# Altium footprint library 1.30-二极管-整流桥堆.PcbLib: 59 footprints (part 3 of 4)
Each footprint in its own frame and in the unit in brackets; x right, y up, seen from the top. Pads: shape width x height; smd on the part's side, far side on the other; paste and mask are expansions set on the pad; w line width, h text height; cw(c..) or ccw(c..) is an arc to the next point about the centre after c.
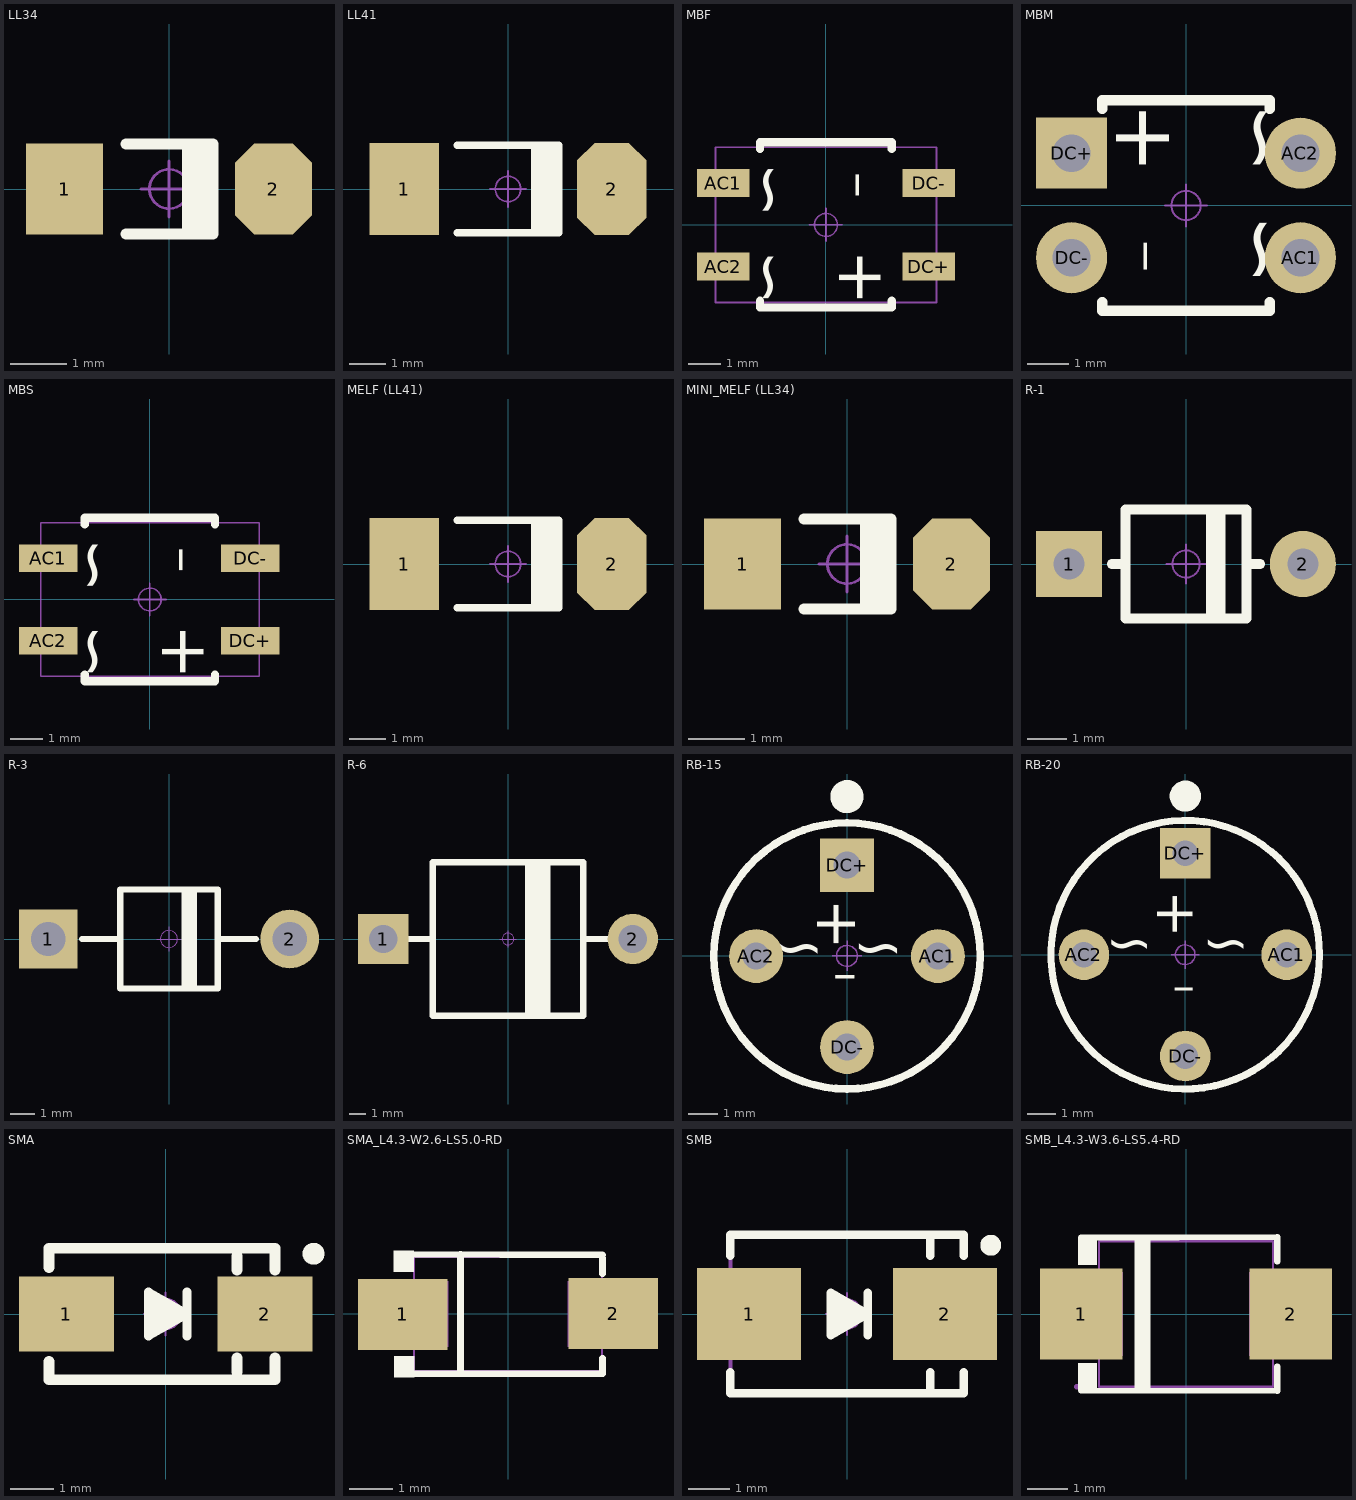
[diagram p2: the footprints below, top view; thin cyan lines are the x and y axes]

## LL34 [mm] "1.5*3.4mm(直径，脚距）"
pads (2):
  rect 1.37x1.62 smd: 1(-1.855,0)
  oct 1.37x1.62 smd: 2(1.855,0)
Top Overlay:
  rectangle: 0.227,-0.8 0.777,0.8
  lines w0.2: -0.762,-0.8 0.777,-0.8 0.777,0.8 -0.762,0.8
Mechanical 15:
  circle w0.05: c0,0 r0.35
  lines w0.05: -0.5,0 0.5,0 ; 0,-0.5 0,0.5
3D body "MINI-MELF.STEP": height 1.5, standoff 0, extent -1.701,-0.75 1.701,0.75

## LL41 [mm] "2.4*5.3mm(直径，脚距）"
height 2.54
pads (2):
  rect 1.9x2.54 smd: 1(-2.85,0)
  oct 1.9x2.54 smd: 2(2.85,0)
Top Overlay:
  rectangle: 0.85,-1.2 1.4,1.2
  rectangle: 0.635,-1.2 0.85,1.2
  lines w0.2: -1.4,-1.2 1.4,-1.2 1.4,1.2 -1.4,1.2
Mechanical 15:
  circle w0.05: c0,0 r0.35
  lines w0.05: -0.5,0 0.5,0 ; 0,-0.5 0,0.5
3D body "MELF.STEP": height 2.4, standoff 0, extent -2.651,-1.2 2.651,1.2

## MBF [mm] "4.7*7*1.5mm(长宽高)"
height 12.3
pads (4):
  rect 1.6x0.85 smd: AC1(-3.127,1.27) AC2(-3.127,-1.27) DC+(3.127,-1.27) DC-(3.127,1.27)
Top Overlay:
  lines w0.254: -2.007,-2.311 -2.007,-2.515 2.007,-2.515 2.007,-2.311 ; -2.007,2.311 -2.007,2.515 2.007,2.515 2.007,2.311
  text "~" at -0.635,1.905 h2.54
  text "~" at -0.635,-0.762 h2.54
  text "-" at 2.159,1.651 h3.05
  text "+" at 2.159,-0.762 h2.54
Mechanical 13:
  lines w0.05: -3.363,-2.363 3.363,-2.363 3.363,2.362 -3.363,2.362 -3.363,-2.363
Mechanical 15:
  circle w0.05: c0,0 r0.35
  lines w0.05: -0.5,0 0.5,0 ; 0,-0.5 0,0.5
3D body "MBF.STEP": height 1.6, standoff -0.03, extent -3.5,-2.35 3.5,2.35

## MBM [mm] "4.8*5.2*2.5mm(长宽高)"
pads (4):
  round 1.7 hole 0.9: AC1(2.737,-1.25) AC2(2.737,1.25) DC-(-2.737,-1.25)
  rect 1.7x1.7 hole 0.9: DC+(-2.737,1.25)
Top Overlay:
  lines w0.254: -2.007,-2.311 -2.007,-2.515 2.007,-2.515 2.007,-2.311 ; -2.007,2.311 -2.007,2.515 2.007,2.515 2.007,2.311
  text "~" at 0.635,-1.905 h2.54
  text "~" at 0.635,0.762 h2.54
  text "-" at -2.159,-1.651 h3.05
  text "+" at -2.159,0.762 h2.54
Mechanical 15:
  circle w0.05: c0,0 r0.35
  lines w0.05: -0.5,0 0.5,0 ; 0,-0.5 0,0.5
3D body "MBM.STEP": height 2.6, standoff -3.11, extent -3.154,-2.4 3.094,2.4

## MBS [mm] "4.1*6.8*2.5mm(长宽高)"
height 12.3
pads (4):
  rect 1.8x0.85 smd: AC1(-3.127,1.27) AC2(-3.127,-1.27) DC+(3.096,-1.27) DC-(3.096,1.27)
Top Overlay:
  lines w0.254: -2.007,-2.311 -2.007,-2.515 2.007,-2.515 2.007,-2.311 ; -2.007,2.311 -2.007,2.515 2.007,2.515 2.007,2.311
  text "~" at -0.635,1.905 h2.54
  text "~" at -0.635,-0.762 h2.54
  text "-" at 2.159,1.651 h3.05
  text "+" at 2.159,-0.762 h2.54
Mechanical 13:
  lines w0.05: -3.363,-2.363 -3.363,2.362 3.363,2.362 3.363,-2.363 -3.363,-2.363
Mechanical 15:
  circle w0.05: c0,0 r0.35
  lines w0.05: -0.5,0 0.5,0 ; 0,-0.5 0,0.5
3D body "MBS.STEP": height 2.6, standoff -0.03, extent -3.4,-2.4 3.4,2.4

## MELF (LL41) [mm] "2.4*5.3mm(直径，脚距）"
height 2.54
pads (2):
  rect 1.9x2.54 smd: 1(-2.85,0)
  oct 1.9x2.54 smd: 2(2.85,0)
Top Overlay:
  rectangle: 0.85,-1.2 1.4,1.2
  rectangle: 0.635,-1.2 0.85,1.2
  lines w0.2: -1.4,-1.2 1.4,-1.2 1.4,1.2 -1.4,1.2
Mechanical 15:
  circle w0.05: c0,0 r0.35
  lines w0.05: -0.5,0 0.5,0 ; 0,-0.5 0,0.5
3D body "MELF.STEP": height 2.4, standoff 0, extent -2.651,-1.2 2.651,1.2

## MINI_MELF (LL34) [mm] "1.5*3.4mm(直径，脚距）"
pads (2):
  rect 1.37x1.62 smd: 1(-1.855,0)
  oct 1.37x1.62 smd: 2(1.855,0)
Top Overlay:
  rectangle: 0.227,-0.8 0.777,0.8
  lines w0.2: -0.762,-0.8 0.777,-0.8 0.777,0.8 -0.762,0.8
Mechanical 15:
  circle w0.05: c0,0 r0.35
  lines w0.05: -0.5,0 0.5,0 ; 0,-0.5 0,0.5
3D body "MINI-MELF.STEP": height 1.5, standoff 0, extent -1.701,-0.75 1.701,0.75

## R-1 [mm] "2.5*6mm(直径，脚距）            淘宝ID:黄晶宝石"
pads (2):
  rect 1.7x1.7 hole 0.8: 1(-3,0)
  round 1.7 hole 0.8: 2(3,0)
Top Overlay:
  rectangle: 0.508,-1.397 1.016,1.397
  lines w0.254: -1.905,0 -1.55,0 ; 1.55,0 1.905,0 ; -1.55,-1.397 -1.55,1.397 1.55,1.397 1.55,-1.397 -1.55,-1.397
Mechanical 15:
  circle w0.05: c0,0 r0.35
  lines w0.05: -0.5,0 0.5,0 ; 0,-0.5 0,0.5
3D body "R-1.STEP": height 2.55, standoff -3.45, extent -3.3,-1.251 3.3,1.251

## R-3 [mm] "3.9*9.9mm(直径，脚距）                            淘宝ID:黄晶宝石"
pads (2):
  rect 2.4x2.4 hole 1.4: 1(-4.95,0)
  round 2.4 hole 1.4: 2(4.95,0)
Top Overlay:
  rectangle: 0.508,-2.032 1.143,2.032
  lines w0.254: -3.556,0 -2,0 ; 2.032,0 3.556,0 ; -2,-2.032 2,-2.032 2,2.032 -2,2.032 -2,-2.032
Mechanical 15:
  circle w0.05: c0,0 r0.35
  lines w0.05: -0.5,0 0.5,0 ; 0,-0.5 0,0.5
3D body "R-3.STEP": height 3.95, standoff -3.45, extent -5.5,-1.951 5.5,1.951

## R-6 [mm] "8.8*14.9mm(直径，脚距）             淘宝ID:黄晶宝石"
pads (2):
  rect 3x3 hole 1.7: 1(-7.45,0)
  round 3 hole 1.7: 2(7.45,0)
Top Overlay:
  rectangle: 1.016,-4.572 2.54,4.572
  lines w0.381: -6.056,0 -4.5,0 ; 4.5,0 6.024,0 ; -4.5,-4.572 -4.5,4.572 4.5,4.572 4.5,-4.572 -4.5,-4.572
Mechanical 15:
  circle w0.05: c0,0 r0.35
  lines w0.05: -0.5,0 0.5,0 ; 0,-0.5 0,0.5
3D body "R-6.STEP": height 8.85, standoff -3.45, extent -8.1,-4.401 8.1,4.401

## RB-15 [mm] "8.9*3.5mm(直径，高)"
pads (4):
  round 1.8 hole 0.9: AC1(3.041,-0.007) AC2(-3.041,-0.007) DC-(0,-3.048)
  rect 1.8x1.8 hole 0.9: DC+(0,3.033)
Top Overlay:
  circle w0.254: c0,0 r4.45
  circle w0.6: c0,5.327 r0.254
  text "+" at 0.762,1.905 h2.54
  text "-" at 0.381,-1.905 h3.05
  text "~" at -0.762,-0.889 h2.54
  text "~" at 1.905,-0.889 h2.54
Mechanical 15:
  circle w0.05: c0,0 r0.35
  lines w0.05: -0.5,0 0.5,0 ; 0,-0.5 0,0.5
3D body "RB-15.STEP": height 3.55, standoff -3.45, extent -4.45,-4.45 4.45,4.45

## RB-20 [mm] "8.9*3.5mm(直径，高)"
pads (4):
  round 1.8 hole 0.9: AC1(3.606,0) AC2(-3.606,0) DC-(0,-3.606)
  rect 1.8x1.8 hole 0.9: DC+(0,3.606)
Top Overlay:
  circle w0.6: c0,5.639 r0.254
  circle w0.254: c0,0 r4.775
  text "~" at 2.286,-0.762 h2.54
  text "~" at -1.143,-0.762 h2.54
  text "-" at 0.381,-2.413 h3.05
  text "+" at 0.762,2.286 h2.54
Mechanical 15:
  circle w0.05: c0,0 r0.35
  lines w0.05: -0.5,0 0.5,0 ; 0,-0.5 0,0.5
3D body "RB-20.STEP": height 5.35, standoff -3.5, extent -4.625,-4.625 4.625,4.625

## SMA [mm] "4.5x2.6*2.2mm（长宽高，不包括引脚）"
height 2.54
pads (2):
  rect 2.2x1.75 smd: 1(-2.3,0) 2(2.3,0)
Top Overlay:
  circle w0.254: c3.429,1.397 r0.127
  lines w0.203: 0.494,-0.508 0.494,0.508 ; -0.395,-0.508 0.494,0 -0.395,0.508 -0.395,-0.508
  lines w0.254: -2.7,-1.105 -2.7,-1.524 2.54,-1.524 2.54,-1.016 ; -2.7,1.08 -2.7,1.524 2.54,1.524 2.54,1.016 ; -0.33,0.305 0.305,0 -0.254,-0.305 -0.254,0.051 0.023,0 ; 1.651,-1.35 1.651,-1.016 ; 1.651,1.016 1.651,1.35
Mechanical 15:
  circle w0.05: c0,0 r0.35
  lines w0.05: -0.5,0 0.5,0 ; 0,-0.5 0,0.5
3D body "SMA.STEP": height 2.15, standoff 0.04, extent -2.528,-1.3 2.575,1.3

## SMA_L4.3-W2.6-LS5.0-RD [mm]
pads (2):
  rect 2.046x1.62 smd: 1(-2.404,-0.009) 2(2.404,0.009)
Top Overlay:
  region: -2.158,1.44 -2.158,0.962 -2.615,0.962 -2.615,1.44
  region: -2.145,-1.44 -2.145,-0.962 -2.602,-0.962 -2.602,-1.44
  lines w0.152: -2.526,1.364 2.159,1.346 ; -2.504,-1.364 2.165,-1.364 ; -1.085,-1.364 -1.085,1.364 ; 2.159,-1.364 2.159,-1.013 ; 2.159,0.919 2.159,1.27
Mechanical 6:
  region: -2.432,-0.097 -2.432,0.097 -1.659,0.097 -1.659,-0.097
  region: 2.432,-0.097 2.432,0.097 1.659,0.097 1.659,-0.097
  region: 2.142,-0.644 2.142,0.644 1.949,0.644 1.949,-0.644
Mechanical 15:
  region: -2.44,-1.3 -2.44,-1.325 -2.475,-1.36 -2.525,-1.36 -2.56,-1.325 -2.56,-1.3 -2.56,-1.275 -2.525,-1.24 -2.475,-1.24 -2.44,-1.275 -2.44,-1.3
  region: 2.5,-0.75 2.5,0.75 1.36,0.75 1.36,-0.75
  region: -2.5,0.75 -2.5,-0.75 -1.36,-0.75 -1.36,0.75
  lines w0.051: -2.15,-1.3 -2.15,1.3 2.15,1.3 2.15,-1.3 -2.15,-1.3
3D body "SMA.STEP": height 2.15, standoff 0.04, extent -2.529,-1.3 2.574,1.3

## SMB [mm] "4.7*3.9*2.2mm(长宽高，不包括引脚）"
height 2.4
pads (2):
  rect 2.5x2.2 smd: 1(-2.35,0) 2(2.35,0)
Top Overlay:
  circle w0.25: c3.45,1.65 r0.125
  lines w0.2: -2.8,-1.4 -2.8,-1.9 2.8,-1.9 2.8,-1.4 ; -2.8,1.4 -2.8,1.9 2.8,1.9 2.8,1.4 ; 2,-1.9 2,-1.4 ; 2,1.4 2,1.9
  lines w0.203: 0.5,-0.508 0.5,0.508 ; -0.389,-0.508 0.5,0 -0.389,0.508 -0.389,-0.508
  lines w0.254: -0.254,0 0.279,0 ; 0.279,0 -0.229,-0.305 -0.229,0.279 0.279,0
Mechanical 13:
  lines w0.1: 2.8,-1.9 -2.8,-1.9 -2.8,1.9 2.8,1.9
Mechanical 15:
  circle w0.05: c0,0 r0.35
  lines w0.05: -0.5,0 0.5,0 ; 0,-0.5 0,0.5
3D body "SMB.STEP": height 2.35, standoff 0.04, extent -2.629,-1.8 2.675,1.8

## SMB_L4.3-W3.6-LS5.4-RD [mm]
pads (2):
  rect 2.047x2.241 smd: 1(-2.591,0) 2(2.591,0)
Top Overlay:
  region: -1.27,1.892 -1.27,-1.895 -0.889,-1.895 -0.889,1.893
  region: -2.667,1.905 -2.667,1.215 -2.21,1.215 -2.21,1.905
  region: -2.667,-1.905 -2.667,-1.215 -2.21,-1.215 -2.21,-1.905
  lines w0.152: -2.597,1.889 2.253,1.905 2.257,1.905 2.257,1.301 ; -2.593,-1.892 2.257,-1.905 2.257,-1.301
Mechanical 6:
  region: 1.771,-0.129 1.771,0.125 3.422,0.125 3.422,-0.129
  region: 2.724,-0.828 2.47,-0.828 2.47,0.823 2.724,0.823
  region: -3.492,-0.127 -3.492,0.127 -1.841,0.127 -1.841,-0.127
Mechanical 15:
  region: 2.699,-1.037 1.56,-1.037 1.56,1.038 2.699,1.038
  region: -2.7,1.037 -1.56,1.037 -1.56,-1.037 -2.7,-1.037
  region: -2.64,-1.8 -2.64,-1.825 -2.675,-1.86 -2.725,-1.86 -2.76,-1.825 -2.76,-1.8 -2.76,-1.775 -2.725,-1.74 -2.675,-1.74 -2.64,-1.775 -2.64,-1.8
  lines w0.051: -2.15,-1.8 2.15,-1.8 2.15,1.8 -2.15,1.8 -2.15,-1.8
3D body "SMB.STEP": height 2.35, standoff 0.04, extent -2.652,-1.8 2.652,1.8